# EAGLE library part 6210XX21021_62101021021 (library WR-PHD)
WR-PHD 1.27 mm SMT Dual Pin Header, H=3.80 mm Article Properties Pins 4 unitless; 6 unitless; 8 unitless; 10 unitless; 14 unitless; 16 unitless; 20 unitless; 28 unitless; 40 unitless; 44 unitless; 50 unitless General Information Operating Temperature -40 °C up to +105 °C Compliance Lead free / RoHS Pitch 1.27 mm Durability 50 Cycles Rows Dual Gender Pin Header Type Straight Material Properties Insulator Material PA9T Insulator Flammability Rating UL94 V-0 Contact Material Copper Alloy Contact Plating Gold Contact Type Stamped Certification UL Approval E323964 Packaging Properties Packaging Tape and Reel with Cap; Tube Electrical Properties IR 1 A Withstanding Voltage 500 V (AC) Contact Resistance 20 mΩ RISO 1000 MΩ <https://www.we-online.com/components/media/o33195v209%20Family_WR-PDH_621xxx21021.jpg> Details see: www.we-online.com/en/components/products/PHD_1_27_SMT_DUAL_PIN_HEADER_6210XX21021 <www.we-online.com/catalog/PHD_1_27_SMT_DUAL_PIN_HEADER_6210XX21021/?utm_source=eagle_model&utm_medium=description_link&utm_campaign=eisos_eagle> Updated by Ella 2024-01-31 2024 (C) Würth Elektronik
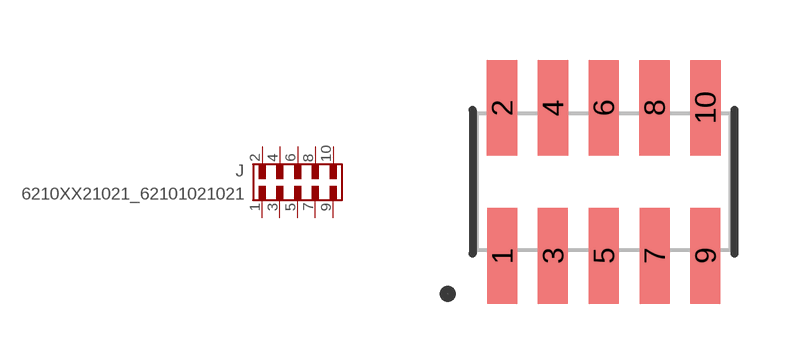
[diagram p386: symbol with the pads of 62101021021; footprint 62101021021]

Designator prefix J

## 6210XX21021_62101021021 (DATASHEET-URL: https://www.we-online.com/redexpert/spec/62101021021?ae; GENDER: Pin Header; IR: 1A; MOUNT: SMT; PACKAGING: Tube; PART-NUMBER: 62101021021; PINS: 10; PITCH: 1.27 mm; ROWS: Dual; TYPE: Straight; VALUE: 62101021021)  [62101021021]
1  1  pas
2  2  pas
3  3  pas
4  4  pas
5  5  pas
6  6  pas
7  7  pas
8  8  pas
9  9  pas
10  10  pas

## Footprint 62101021021 (pad centres in mm)
WR-PHD 1.27 mm SMT Dual Pin Header, H=3.80 mm, 10Pins
smd 0.75 x 2.4: 1 -2.54,-1.85; 3 -1.27,-1.85; 5 0,-1.85; 7 1.27,-1.85; 9 2.54,-1.85
smd 0.76 x 2.4: 2 -2.54,1.85; 4 -1.27,1.85; 6 0,1.85; 8 1.27,1.85; 10 2.54,1.85